# Altium footprint library STM32BluePill.PcbLib: 1 footprints
Each footprint in its own frame and in the unit in brackets; x right, y up, seen from the top. Pads: shape width x height; smd on the part's side, far side on the other; paste and mask are expansions set on the pad; w line width, h text height; cw(c..) or ccw(c..) is an arc to the next point about the centre after c.
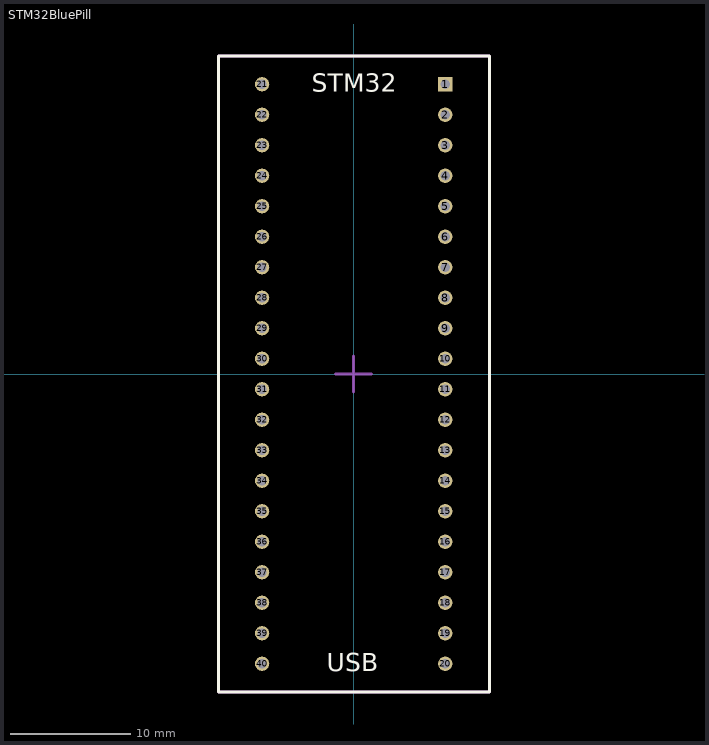
[diagram p0: the footprint, top view; thin cyan lines are the x and y axes]

## STM32BluePill [mil]
pads (40):
  rect 47x47 hole 30 mask+2: 1(300.2,950)
  round 47 hole 30 mask+2: 2(300.2,850) 3(300.2,750) 4(300.2,650) 5(300.2,550) 6(300.2,450) 7(300.2,350) 8(300.2,250) 9(300.2,150) 10(300.2,50) 11(300.2,-50) 12(300.2,-150) 13(300.2,-250) 14(300.2,-350) 15(300.2,-450) 16(300.2,-550) 17(300.2,-650) 18(300.2,-750) 19(300.2,-850) 20(300.2,-950) 21(-300.2,950) 22(-300.2,850) 23(-300.2,750) 24(-300.2,650) 25(-300.2,550) 26(-300.2,450) 27(-300.2,350) 28(-300.2,250) 29(-300.2,150) 30(-300.2,50) 31(-300.2,-50) 32(-300.2,-150) 33(-300.2,-250) 34(-300.2,-350) 35(-300.2,-450) 36(-300.2,-550) 37(-300.2,-650) 38(-300.2,-750) 39(-300.2,-850) 40(-300.2,-950)
Top Overlay:
  lines w9.84: -442.72,1042.32 -442.72,-1043.31 445.08,-1043.31 445.08,1043.31 -441.73,1043.31
  text "STM32" at -137.64,925.35 h60
  text "USB" at -88.43,-974.25 h60
Mechanical 13:
  lines w9.84: -442.72,-1043.31 445.08,-1043.31 445.08,1043.31 -442.72,1043.31 -442.72,-1043.31
Mechanical 15:
  lines w9.84: -58.86,0 0.2,0 ; 0.2,-59.06 0.2,0 ; 0.2,59.06 0.2,0 ; 59.25,0 0.2,0
3D body "1x20 Female Header Pins.step": height 334.65, standoff -118.11, extent 250.19,-999.99 350.19,1000.01
3D body "1x20 Female Header Pins.step": height 334.65, standoff -118.11, extent -350.2,-999.99 -250.2,1000.01
3D body "STM32BluePill.step": height 751.97, standoff 259.84, extent -444.57,-1043.31 445.2,1043.3